# Altium schematic symbol library TCM809SENB713.SchLib: 1 symbol
Pins are listed as number, name and electrical type; pins without a type are passive.

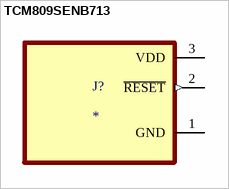
[diagram p0: symbol TCM809SENB713]

## TCM809SENB713
designator J?
MP: TCM809SENB713; Package: None; Price: None; Value: *; Availability: Unavailable
footprint SOT95P237X112-3N
pins: 1 GND (power), 2 ~{RESET} (out), 3 VDD (power)